# Altium footprint library BOARD_220V-20V.PcbLib: 1 footprints
Each footprint in its own frame and in the unit in brackets; x right, y up, seen from the top. Pads: shape width x height; smd on the part's side, far side on the other; paste and mask are expansions set on the pad; w line width, h text height; cw(c..) or ccw(c..) is an arc to the next point about the centre after c.
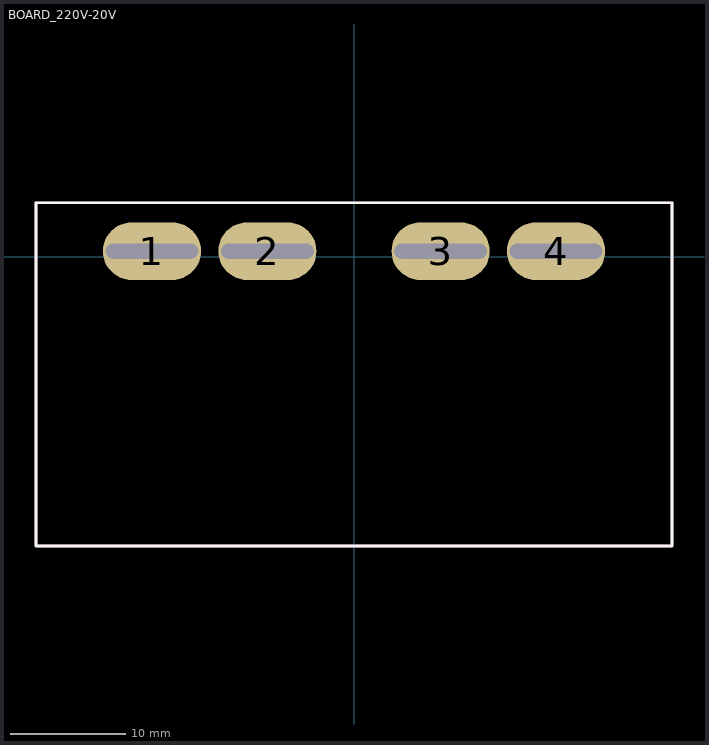
[diagram p0: the footprint, top view; thin cyan lines are the x and y axes]

## BOARD_220V-20V [mm]
pads (4):
  oval 8.5x5 hole 1.3 slot 8 at 0 deg: 1(-17.5,0.5) 2(-7.5,0.5) 3(7.5,0.5) 4(17.5,0.5)
Top Overlay:
  lines w0.254: -27.559,-25.019 27.559,-25.019 27.559,4.699 -27.559,4.699 -27.559,-25.019
Top Assembly:
  lines w0.254: -27.559,-25.019 27.559,-25.019 27.559,4.699 -27.559,4.699 -27.559,-25.019
  text "'.Designator'" at 0,0 h0.7
3D body "POWER_SUPPLY_220V.step": height 78, standoff -4.83, extent -27.5,-25.002 27.5,6.4